# Altium schematic symbol library Modulos.SchLib: 14 symbols
Pins are listed as number, name and electrical type; pins without a type are passive.

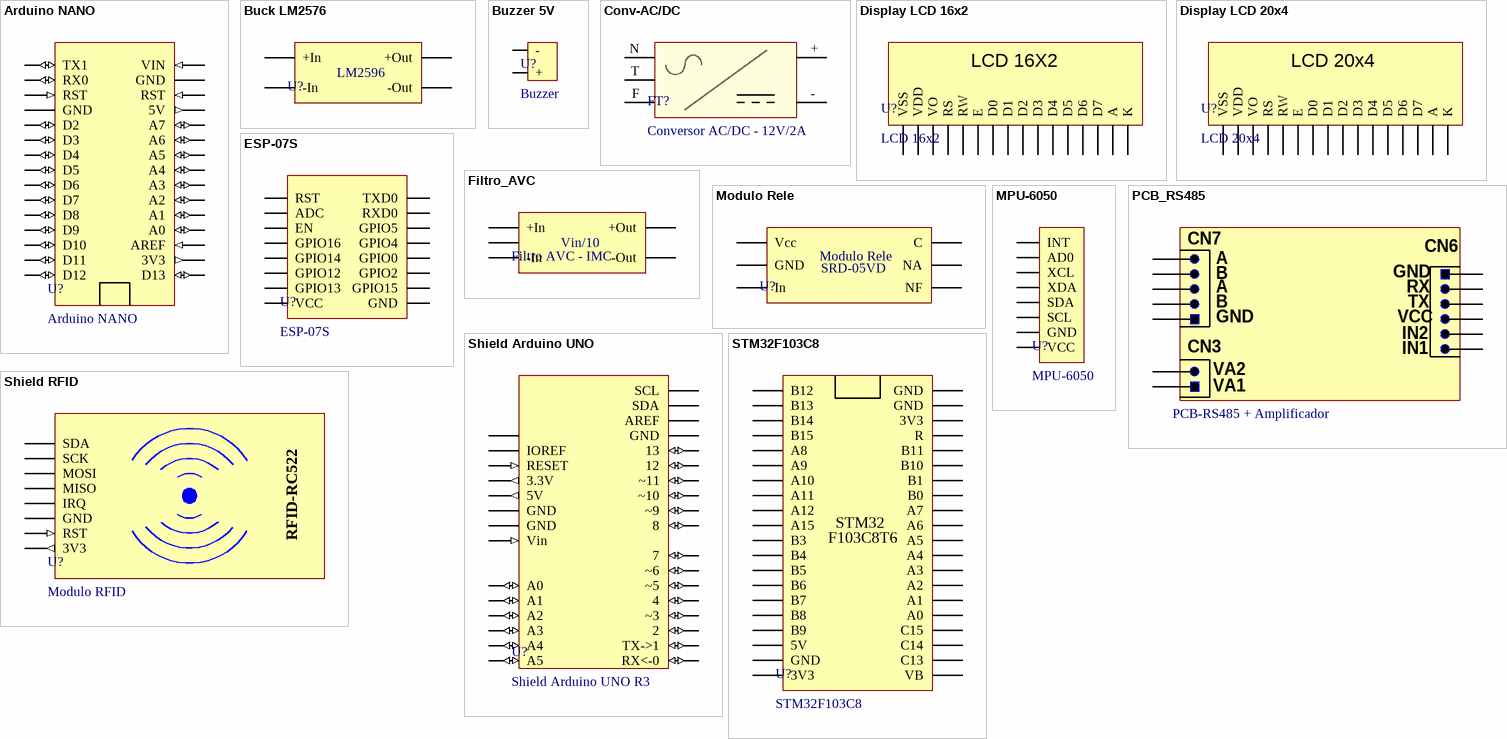
[diagram p0: symbols Arduino NANO to STM32F103C8]

## Arduino NANO
designator U?
footprint Arduino NANO
pins: 0 D13 (io), 1 3V3 (out), 2 AREF (in), 3 A0 (io), 4 A1 (io), 5 A2 (io), 6 A3 (io), 7 A4 (io), 8 A5 (io), 9 A6 (io), 10 A7 (io), 11 5V (out), 12 RST (in), 13 GND (power), 14 VIN (in), 15 D12 (io), 16 D11 (io), 17 D10 (io), 18 D9 (io), 19 D8 (io), 20 D7 (io), 21 D6 (io), 22 D5 (io), 23 D4 (io), 24 D3 (io), 25 D2 (io), 26 GND (power), 27 RST (in), 28 RX0 (io), 29 TX1 (io)

## Buck LM2576
designator U?, comment Buck  (value not drawn)
Conversor DC-DC LM2576
footprint Buck LM2596
pins: 1 -In, 2 +In, 3 +Out, 4 -Out
text: LM2596

## Buzzer 5V
designator U?, comment Buzzer
Buzzers Indicator, Internally Driven Magnetic 5V 30mA 2.73kHz 82dB @ 5V, 10cm Through Hole PC Pins; Partnumber: AI-1027-TWT-5V-2-R
footprint Buzzer (AI-1027-TWT-5V-2-R)
pins: 1 +, 2 -

## Conv-AC/DC
designator FT?, comment Conversor AC/DC - 12V/2A
Fonte chaveada AC/DC
pins: + 4, - 5, F 1, N 3, T 2

## Display LCD 16x2
designator U?, comment LCD 16x2
footprint LCD 16X2
pins: A, D0, D1, D2, D3, D4, D5, D6, D7, E, K, RS, RW, VDD, VO, VSS
text: LCD 16X2

## Display LCD 20x4
designator U?, comment LCD 20x4
footprint LCD 20X4
pins: A, D0, D1, D2, D3, D4, D5, D6, D7, E, K, RS, RW, VDD, VO, VSS

## ESP-07S
designator U?
WiFi Module 2.4GHz ESP-07S
footprint ESP-07S (ESP-07S WIFI MODULE)
pins: 1 RST, 2 ADC, 3 EN, 4 GPIO16, 5 GPIO14, 6 GPIO12, 7 GPIO13, 8 VCC, 9 GND, 10 GPIO15, 11 GPIO2, 12 GPIO0, 13 GPIO4, 14 GPIO5, 15 RXD0, 16 TXD0

## Filtro_AVC
designator Filtro AVC - IMC, comment Filtro AVC  (value not drawn)
Filtro para leitura de tensão AVC (Div10)
pins: +In, +Out, -In, -Out, NC
text: Vin/10

## Modulo Rele
designator U?  (value not drawn)
Modulo Rele Arduino
pins: C, GND, In, NA, NF, Vcc
text: SRD-05VD

## MPU-6050
designator U?
Triple Axis Accelerometer and Gyro Breakout Board‎
footprint MPU-6050
pins: AD0, GND, INT, SCL, SDA, VCC, XCL, XDA

## PCB_RS485
designator PCB?, comment PCB-RS485 + Amplificador
pins: 1, 2, 3, 4, 5, 6, 7, 8, 9, 10, 11, 12, 13
text: CN7; CN6; A; GND; B; RX; TX; VCC; IN2; CN3; IN1; VA2; VA1

## Shield Arduino UNO
designator U?, comment Shield Arduino UNO R3
Shield for Arduino UNO R3 Board
footprint Shield_UNO
pins: 0 RX<-0 (io), 1 TX->1 (io), 2 (io), 3 ~3 (io), 4 (io), 5 ~5 (io), 6 ~6 (io), 7 (io), 8 (io), 9 ~9 (io), 10 ~10 (io), 11 ~11 (io), 12 (io), 13 (io), 14 GND, 15 AREF, 16 SDA, 17 SCL, 18 A5 (io), 19 A4 (io), 20 A3 (io), 21 A2 (io), 22 A1 (io), 23 A0 (io), 24 Vin (in), 25 GND, 26 GND, 27 5V (out), 28 3.3V (out), 29 RESET (in), 30 IOREF, 31

## Shield RFID
designator U?, comment Modulo RFID
Shield Tag RFID Reader RC522
footprint RFID-RC522
pins: 1 3V3 (out), 2 RST (in), 3 GND (power), 4 IRQ, 5 MISO, 6 MOSI, 7 SCK, 8 SDA
text: RFID-RC522

## STM32F103C8
designator U?
Placa De Desenvolvimento Stm32f103c8t6 Arm
footprint STM32F103C8
pins: 1 B12, 2 B13, 3 B14, 4 B15, 5 A8, 6 A9, 7 A10, 8 A11, 9 A12, 10 A15, 11 B3, 12 B4, 13 B5, 14 B6, 15 B7, 16 B8, 17 B9, 18 5V, 19 GND, 20 3V3, 21 VB, 22 C13, 23 C14, 24 C15, 25 A0, 26 A1, 27 A2, 28 A3, 29 A4, 30 A5, 31 A6, 32 A7, 33 B0, 34 B1, 35 B10, 36 B11, 37 R, 38 3V3, 39 GND, 40 GND
text: STM32; F103C8T6